# Altium schematic symbol library IC_Digital.SchLib: 23 symbols
Pins are listed as number, name and electrical type; pins without a type are passive.

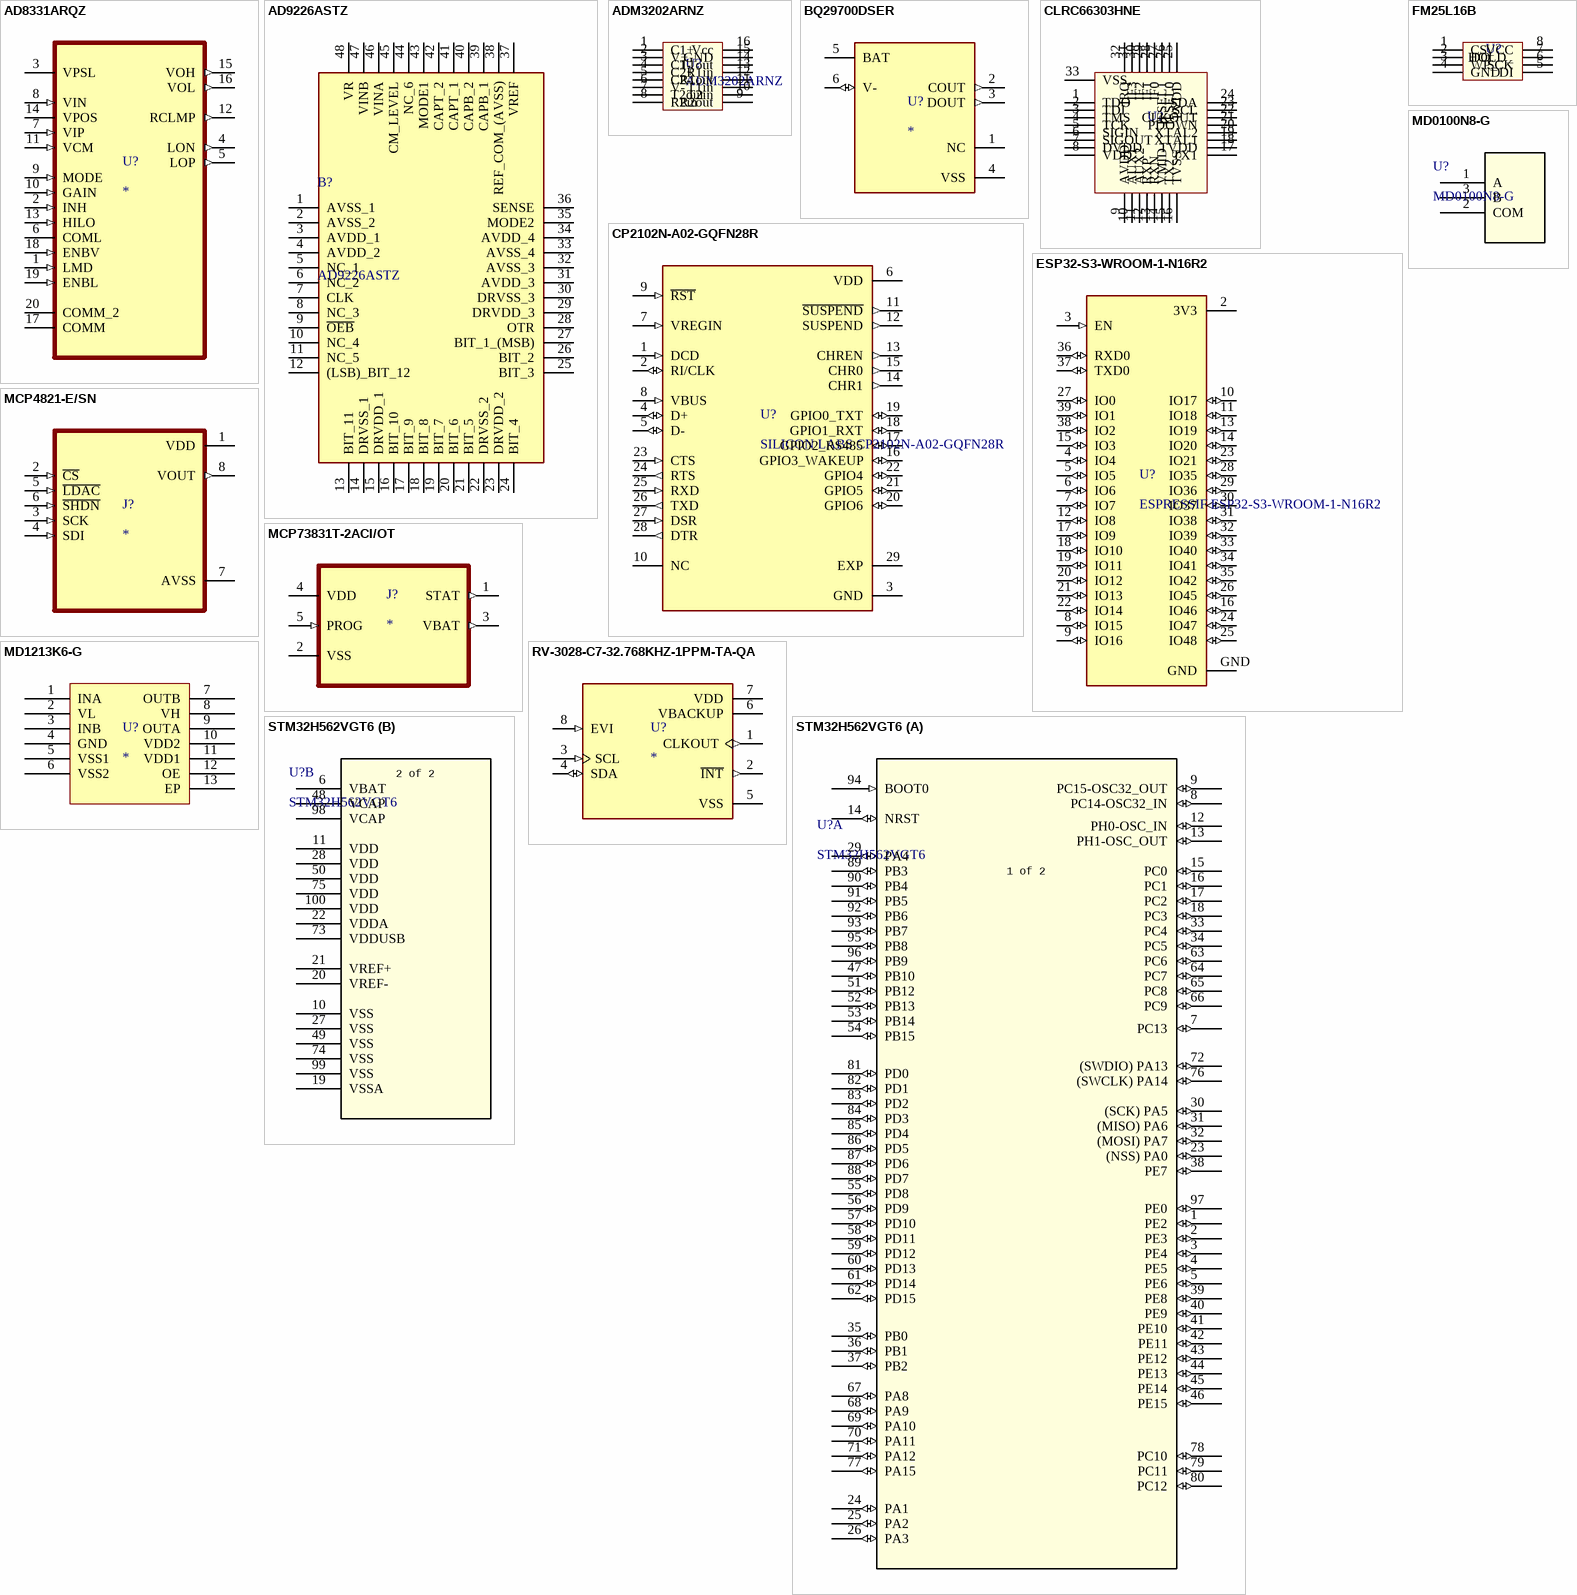
[diagram p0: symbols AD8331ARQZ to STM32H562VGT6]

## AD8331ARQZ
designator U?
Single VGA with Ultralow Noise Preamplifier and Programmable RIN; MF: Analog Devices; MP: AD8331ARQZ; SnapEDA_Link: https://www.snapeda.com/parts/AD8331ARQZ/Analog+Devices/view-part/?ref=snap; Package: QSOP-20 Analog Devices; Value: *; Check_prices: https://www.snapeda.com/parts/AD8331ARQZ/Analog+Devices/view-part/?ref=eda
footprint SOP64P600X165-20N
pins: 1 LMD (in), 2 INH (in), 3 VPSL (power), 4 LON (out), 5 LOP (out), 6 COML, 7 VIP (in), 8 VIN (in), 9 MODE (in), 10 GAIN (in), 11 VCM (in), 12 RCLMP (out), 13 HILO (in), 14 VPOS (power), 15 VOH (out), 16 VOL (out), 17 COMM, 18 ENBV (in), 19 ENBL (in), 20 COMM_2

## AD9226ASTZ
designator B?
AD9226ASTZ, 12 bit-Bit DAC 65Msps, Parallel, 48-Pin LQFP; Manufacturer_Name: Analog Devices; Geometry.Height: 1.6mm; Manufacturer_Part_Number: AD9226ASTZ; Mouser Part Number: 584-AD9226ASTZ; Mouser Price/Stock: https://www.mouser.co.uk/ProductDetail/Analog-Devices/AD9226ASTZ?qs=%2FtpEQrCGXCz2C6o%252BfI8LqA%3D%3D; Arrow Part Number: AD9226ASTZ; Arrow Price/Stock: https://www.arrow.com/en/products/ad9226astz/analog-devices?utm_currency=USD&region=nac; Datasheet Link: https://datasheet.datasheetarchive.com/originals/distributors/Datasheets-4/DSA-70171.pdf
footprint QFP50P900X900X160-48N
pins: 1 AVSS_1, 2 AVSS_2, 3 AVDD_1, 4 AVDD_2, 5 NC_1, 6 NC_2, 7 CLK, 8 NC_3, 9 ~{OEB}, 10 NC_4, 11 NC_5, 12 (LSB)_BIT_12, 13 BIT_11, 14 DRVSS_1, 15 DRVDD_1, 16 BIT_10, 17 BIT_9, 18 BIT_8, 19 BIT_7, 20 BIT_6, 21 BIT_5, 22 DRVSS_2, 23 DRVDD_2, 24 BIT_4, 25 BIT_3, 26 BIT_2, 27 BIT_1_(MSB), 28 OTR, 29 DRVDD_3, 30 DRVSS_3, 31 AVDD_3, 32 AVSS_3, 33 AVSS_4, 34 AVDD_4, 35 MODE2, 36 SENSE, 37 VREF, 38 REF_COM_(AVSS), 39 CAPB_1, 40 CAPB_2, 41 CAPT_1, 42 CAPT_2, 43 MODE1, 44 NC_6, 45 CM_LEVEL, 46 VINA, 47 VINB, 48 VR

## ADM3202ARNZ
designator U?
note: Original; val: ADM3202ARNZ; sample link: https://www.lcsc.com/product-detail/RS232-ICs_Analog-Devices-ADM3202ARNZ-REEL_C496498.html
footprint 16SOIC_N (SOIC, 16-Leads, Body 9,90x3,90mm, Pitch 1,27mm, IPC Medium Density)
pins: 1 C1+, 2 V+, 3 C1-, 4 C2+, 5 C2-, 6 V-, 7 T2out, 8 R2in, 9 R2out, 10 T2in, 11 T1in, 12 R1out, 13 R1in, 14 T1out, 15 GND, 16 Vcc

## BQ29700DSER
designator U?
Li-Ion/Li Polymer Advanced Single-Cell Battery Protector IC Family 6-WSON -40 to 85; MF: Texas Instruments; MP: BQ29700DSER; Price: None; Value: *; Availability: Good; SnapEDA_Link: https://www.snapeda.com/parts/BQ29700DSER/Texas%20Instruments/view-part/535836/?ref=snap; Purchase-URL: https://pricing.snapeda.com/search/part/BQ29700DSER/?ref=eda; Package: WSON-6 Texas Instruments
footprint SON50P150X150X80-6N
pins: 1 NC, 2 COUT (out), 3 DOUT (out), 4 VSS (power), 5 BAT (power), 6 V- (io)

## CLRC66303HNE
designator U?, comment NXP CLRC66303HNE  (value not drawn)
ISO 14443A,ISO 14443B,MIFARE I2C,SPI,UART HVQFN-32-EP(5x5) RFID, RF Access, Monitoring ICs RoHS; sample link: https://www.lcsc.com/product-detail/C468447.html?s_z=n_CLRC663; val: NXP CLRC66303HNE
footprint QFN50P500X500X100_HS-33N (QFN, 32-Leads, Body 5,00x5,00mm, Pitch 0,50mm, Thermal Pad 3,10x3,10mm, IPC Medium Density)
pins: 1 TDO "O", 2 TDI "I", 3 TMS "I", 4 TCK "I", 5 SIGIN "I", 6 SIGOUT "O", 7 DVDD "PWR", 8 VDD "PWR", 9 AVDD "PWR", 10 AUX1 "O", 11 AUX2 "O", 12 RXP "I", 13 RXN "I", 14 VMID "PWR", 15 TX2 "O", 16 TVSS "PWR", 17 TX1 "O", 18 TVDD "PWR", 19 XTAL1 "I", 20 XTAL2 "O", 21 PDOWN "I", 22 CLKOUT "O", 23 SCL "O", 24 SDA "I/O", 25 PVDD "PWR", 26 IFSEL0 "I", 27 IFSEL1 "I", 28 IF0 "I/O", 29 IF1 "I/O", 30 IF2 "I/O", 31 IF3 "I/O", 32 IRQ "O", 33 VSS "PWR"

## CP2102N-A02-GQFN28R
designator U?, comment SILICON LABS CP2102N-A02-GQFN28R
USB to UART USB 2.0 QFN-28-EP(5x5) Interface Controllers RoHS; val: SILICON LABS CP2102N-A02-GQFN28R; note: *; sample link: https://www.lcsc.com/product-detail/C964632.html?s_z=n_CP2102N-A02-GQFN28
footprint IC_CP2102N-A02-GQFN28R
pins: 1 DCD (in), 2 RI/CLK (io), 3 GND (power), 4 D+ (io), 5 D- (io), 6 VDD (power), 7 VREGIN (in), 8 VBUS (in), 9 ~{RST} (in), 10 NC, 11 ~{SUSPEND} (out), 12 SUSPEND (out), 13 CHREN (out), 14 CHR1 (out), 15 CHR0 (out), 16 GPIO3_WAKEUP (io), 17 GPIO2_RS485 (io), 18 GPIO1_RXT (io), 19 GPIO0_TXT (io), 20 GPIO6 (io), 21 GPIO5 (io), 22 GPIO4 (io), 23 CTS (in), 24 RTS (out), 25 RXD (in), 26 TXD (out), 27 DSR (in), 28 DTR (out), 29 EXP (power)

## ESP32-S3-WROOM-1-N16R2
designator U?, comment ESPRESSIF ESP32-S3-WROOM-1-N16R2
2.4GHz ESP32-S3 On-board PCB Antenna -103.5dBm SMD,25.5x18mm RF Transceiver Modules and Modems RoHS; val: ESPRESSIF ESP32-S3-WROOM-1-N16R2; note: *; sample link: https://www.lcsc.com/product-detail/C2913205.html?s_z=n_esp32-s3
footprint XCVR_ESP32-S3-WROOM-1-N16R2
pins: 2 3V3 (power), 3 EN (in), 4 IO4 (io), 5 IO5 (io), 6 IO6 (io), 7 IO7 (io), 8 IO15 (io), 9 IO16 (io), 10 IO17 (io), 11 IO18 (io), 12 IO8 (io), 13 IO19 (io), 14 IO20 (io), 15 IO3 (io), 16 IO46 (io), 17 IO9 (io), 18 IO10 (io), 19 IO11 (io), 20 IO12 (io), 21 IO13 (io), 22 IO14 (io), 23 IO21 (io), 24 IO47 (io), 25 IO48 (io), 26 IO45 (io), 27 IO0 (io), 28 IO35 (io), 29 IO36 (io), 30 IO37 (io), 31 IO38 (io), 32 IO39 (io), 33 IO40 (io), 34 IO41 (io), 35 IO42 (io), 36 RXD0 (io), 37 TXD0 (io), 38 IO2 (io), 39 IO1 (io), GND (power)

## FM25L16B
designator U?
FM25L16B F-RAM; value: FM25L16B; Supplier 1: Digi-Key; Supplier Part Number 1: FM25L16B-GRA-ND
footprint 8SOIC_N (SOIC, 8-Leads, Body 4,90x3,90mm, Pitch 1,27mm, IPC Medium Density)
pins: 1 CS_, 2 DO, 3 WP_, 4 GND, 5 DI, 6 SCK, 7 HOLD_, 8 VCC

## MCP4821-E/SN
designator J?
SINGLE 12-BIT DAC WITH SPI INTERACE AND INTERNAL VREF, SOIC-8 | Microchip Technology Inc. MCP4821-E/SN; SnapEDA_Link: https://www.snapeda.com/parts/MCP4821-E/SN/Microchip+Technology/view-part/?ref=snap; Package: SOIC-8 Microchip; Value: *; MF: Microchip; MP: MCP4821-E/SN; Check_prices: https://www.snapeda.com/parts/MCP4821-E/SN/Microchip+Technology/view-part/?ref=eda
footprint SOIC127P600X175-8N
pins: 1 VDD (power), 2 ~{CS} (in), 3 SCK (in), 4 SDI (in), 5 ~{LDAC} (in), 6 ~{SHDN} (in), 7 AVSS (power), 8 VOUT (out)

## MCP73831T-2ACI/OT
designator J?
Charger IC Lithium Ion/Polymer SOT-23-5; MF: Microchip; MP: MCP73831T-2ACI/OT; Package: SOT-23 Microchip; Purchase-URL: https://pricing.snapeda.com/search/part/MCP73831T-2ACI/OT/?ref=eda; Value: *; Availability: In Stock; SnapEDA_Link: https://www.snapeda.com/parts/MCP73831T-2ACI/OT/Microchip/view-part/?ref=snap; Price: None; Check_prices: https://www.snapeda.com/parts/MCP73831T-2ACI/OT/Microchip/view-part/?ref=eda
footprint SOT95P280X145-5N
pins: 1 STAT (out), 2 VSS (power), 3 VBAT (out), 4 VDD (power), 5 PROG (in)

## MD0100N8-G
designator U?
Description; Manufacturer_Name: Microchip; Copyright: Copyright (C) 2025 Ultra Librarian. All rights reserved.; Manufacturer_Part_Number: MD0100N8-G; RefDes: RefDes; Type: Type
footprint TO-243AA_MCH
pins: 1 A, 2 COM, 3 B

## MD1213K6-G
designator U?
footprint QFN80P400X400X90-13N
pins: 1 INA, 2 VL, 3 INB, 4 GND, 5 VSS1, 6 VSS2, 7 OUTB, 8 VH, 9 OUTA, 10 VDD2, 11 VDD1, 12 OE, 13 EP (power)

## RV-3028-C7-32.768KHZ-1PPM-TA-QA
designator U?
Extreme Low Power RTC Module; MF: {'manufacturer': u'Micro Crystal'}; MP: RV-3028-C7-32.768KHZ-1PPM-TA-QA; Package: None; Price: None; Value: *; Availability: Unavailable
footprint IC_RV-3028-C7-32.768KHZ-1PPM-TA-QA - duplicate
pins: 1 CLKOUT (out), 2 ~{INT} (out), 3 SCL (in), 4 SDA (io), 5 VSS (power), 6 VBACKUP (power), 7 VDD (power), 8 EVI (in)

## STM32H562VGT6
designator U?
High-performance, Arm Cortex-M33 with TrustZone, MCU with 1-MByte Flash, 640-Kbyte RAM, 250 MHz CPU; note: Original; val: STM32H562VGT6; sample link: https://www.lcsc.com/product-detail/C22452133.html?s_z=n_STM32H562
footprint LQFP-100_STM
part A pins: 1 PE2 (io), 2 PE3 (io), 3 PE4 (io), 4 PE5 (io), 5 PE6 (io), 7 PC13 (io), 8 PC14-OSC32_IN (io), 9 PC15-OSC32_OUT (io), 12 PH0-OSC_IN (io), 13 PH1-OSC_OUT (io), 14 NRST (io), 15 PC0 (io), 16 PC1 (io), 17 PC2 (io), 18 PC3 (io), 23 (NSS) PA0 (io), 24 PA1 (io), 25 PA2 (io), 26 PA3 (io), 29 PA4 (io), 30 (SCK) PA5 (io), 31 (MISO) PA6 (io), 32 (MOSI) PA7 (io), 33 PC4 (io), 34 PC5 (io), 35 PB0 (io), 36 PB1 (io), 37 PB2 (io), 38 PE7 (io), 39 PE8 (io), 40 PE9 (io), 41 PE10 (io), 42 PE11 (io), 43 PE12 (io), 44 PE13 (io), 45 PE14 (io), 46 PE15 (io), 47 PB10 (io), 51 PB12 (io), 52 PB13 (io), 53 PB14 (io), 54 PB15 (io), 55 PD8 (io), 56 PD9 (io), 57 PD10 (io), 58 PD11 (io), 59 PD12 (io), 60 PD13 (io), 61 PD14 (io), 62 PD15 (io), 63 PC6 (io), 64 PC7 (io), 65 PC8 (io), 66 PC9 (io), 67 PA8 (io), 68 PA9 (io), 69 PA10 (io), 70 PA11 (io), 71 PA12 (io), 72 (SWDIO) PA13 (io), 76 (SWCLK) PA14 (io), 77 PA15 (io), 78 PC10 (io), 79 PC11 (io), 80 PC12 (io), 81 PD0 (io), 82 PD1 (io), 83 PD2 (io), 84 PD3 (io), 85 PD4 (io), 86 PD5 (io), 87 PD6 (io), 88 PD7 (io), 89 PB3 (io), 90 PB4 (io), 91 PB5 (io), 92 PB6 (io), 93 PB7 (io), 94 BOOT0 (in), 95 PB8 (io), 96 PB9 (io), 97 PE0 (io)
part B pins: 6 VBAT (power), 10 VSS (power), 11 VDD (power), 19 VSSA (power), 20 VREF- (power), 21 VREF+ (power), 22 VDDA (power), 27 VSS (power), 28 VDD (power), 48 VCAP (power), 49 VSS (power), 50 VDD (power), 73 VDDUSB (power), 74 VSS (power), 75 VDD (power), 98 VCAP (power), 99 VSS (power), 100 VDD (power)
part A text: 1 of 2
part B text: 2 of 2

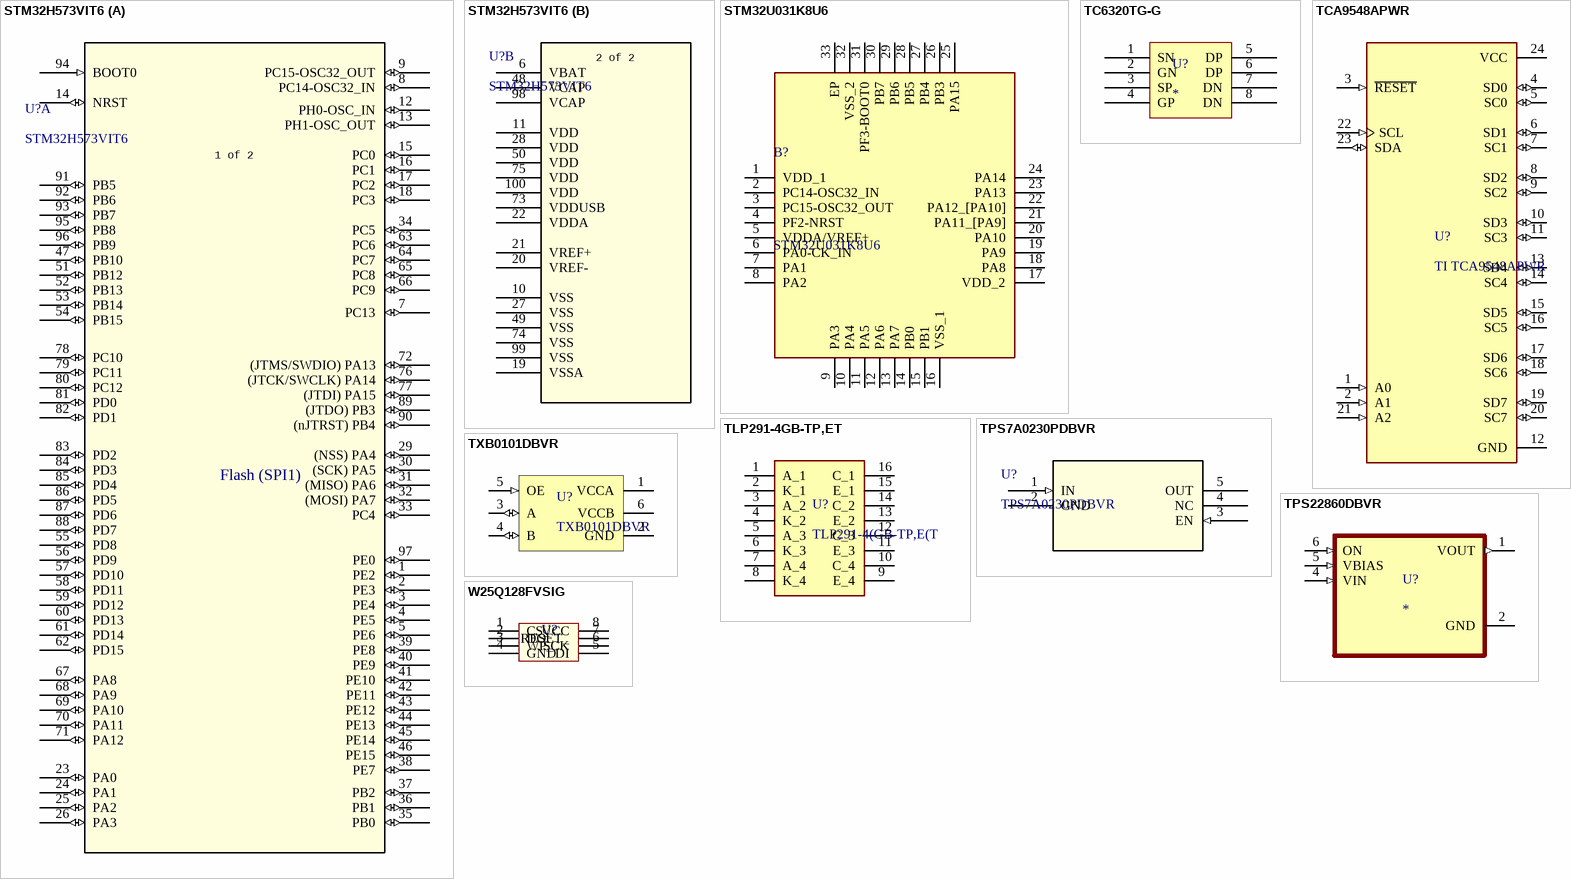
[diagram p1: symbols STM32H573VIT6 to W25Q128FVSIG]

## STM32H573VIT6
designator U?
High-performance, Arm Cortex-M33 with TrustZone, MCU with 1-MByte Flash, 640-Kbyte RAM, 250 MHz CPU; note: Original; val: STM32H573VIT6; sample link: https://www.lcsc.com/product-detail/C7545121.html?s_z=n_stm32h573
footprint LQFP-100_STM
part A pins: 1 PE2 (io), 2 PE3 (io), 3 PE4 (io), 4 PE5 (io), 5 PE6 (io), 7 PC13 (io), 8 PC14-OSC32_IN (io), 9 PC15-OSC32_OUT (io), 12 PH0-OSC_IN (io), 13 PH1-OSC_OUT (io), 14 NRST (io), 15 PC0 (io), 16 PC1 (io), 17 PC2 (io), 18 PC3 (io), 23 PA0 (io), 24 PA1 (io), 25 PA2 (io), 26 PA3 (io), 29 (NSS) PA4 (io), 30 (SCK) PA5 (io), 31 (MISO) PA6 (io), 32 (MOSI) PA7 (io), 33 PC4 (io), 34 PC5 (io), 35 PB0 (io), 36 PB1 (io), 37 PB2 (io), 38 PE7 (io), 39 PE8 (io), 40 PE9 (io), 41 PE10 (io), 42 PE11 (io), 43 PE12 (io), 44 PE13 (io), 45 PE14 (io), 46 PE15 (io), 47 PB10 (io), 51 PB12 (io), 52 PB13 (io), 53 PB14 (io), 54 PB15 (io), 55 PD8 (io), 56 PD9 (io), 57 PD10 (io), 58 PD11 (io), 59 PD12 (io), 60 PD13 (io), 61 PD14 (io), 62 PD15 (io), 63 PC6 (io), 64 PC7 (io), 65 PC8 (io), 66 PC9 (io), 67 PA8 (io), 68 PA9 (io), 69 PA10 (io), 70 PA11 (io), 71 PA12 (io), 72 (JTMS/SWDIO) PA13 (io), 76 (JTCK/SWCLK) PA14 (io), 77 (JTDI) PA15 (io), 78 PC10 (io), 79 PC11 (io), 80 PC12 (io), 81 PD0 (io), 82 PD1 (io), 83 PD2 (io), 84 PD3 (io), 85 PD4 (io), 86 PD5 (io), 87 PD6 (io), 88 PD7 (io), 89 (JTDO) PB3 (io), 90 (nJTRST) PB4 (io), 91 PB5 (io), 92 PB6 (io), 93 PB7 (io), 94 BOOT0 (in), 95 PB8 (io), 96 PB9 (io), 97 PE0 (io)
part B pins: 6 VBAT (power), 10 VSS (power), 11 VDD (power), 19 VSSA (power), 20 VREF- (power), 21 VREF+ (power), 22 VDDA (power), 27 VSS (power), 28 VDD (power), 48 VCAP (power), 49 VSS (power), 50 VDD (power), 73 VDDUSB (power), 74 VSS (power), 75 VDD (power), 98 VCAP (power), 99 VSS (power), 100 VDD (power)
part A text: 1 of 2; Flash (SPI1)
part B text: 2 of 2

## STM32U031K8U6
designator B?
Ultra-low-power features (ultra-low-power devices)  1.71 V to 3.6 V power supply  -40 C to 85/125 C temperature range  VBAT mode: 130 nA (with RTC and 9 x 32-bit backup registers)  Shutdown mode (4 wake-up pins): 16 nA  Standby mode (4 wake-up pins): 160 nA with RTC, 30 nA without RTC  Stop 2 mode: 630 nA with RTC, 515 nA without RTC  Run mode (LDO mode): 52 uA/MHz  Batch acquisition mode (BAM)  4 us wake-up from Stop mode  Brownout reset (BOR); Manufacturer_Name: STMicroelectronics; Geometry.Height: 0.6mm; Manufacturer_Part_Number: STM32U031K8U6; Mouser Part Number: 511-STM32U031K8U6; Mouser Price/Stock: https://www.mouser.co.uk/ProductDetail/STMicroelectronics/STM32U031K8U6?qs=dbcCsuKDzFUeNQ2GzBLCmw%3D%3D; Arrow Part Number: STM32U031K8U6; Arrow Price/Stock: https://www.arrow.com/en/products/stm32u031k8u6/stmicroelectronics.html?utm_currency=USD&region=nac; Datasheet Link: https://www.st.com/resource/en/datasheet/stm32u031f4.pdf
footprint QFN50P500X500X60-33N-D
pins: 1 VDD_1, 2 PC14-OSC32_IN, 3 PC15-OSC32_OUT, 4 PF2-NRST, 5 VDDA/VREF+, 6 PA0-CK_IN, 7 PA1, 8 PA2, 9 PA3, 10 PA4, 11 PA5, 12 PA6, 13 PA7, 14 PB0, 15 PB1, 16 VSS_1, 17 VDD_2, 18 PA8, 19 PA9, 20 PA10, 21 PA11_[PA9], 22 PA12_[PA10], 23 PA13, 24 PA14, 25 PA15, 26 PB3, 27 PB4, 28 PB5, 29 PB6, 30 PB7, 31 PF3-BOOT0, 32 VSS_2, 33 EP

## TC6320TG-G
designator U?
footprint SOIC127P600X175-8N
pins: 1 SN, 2 GN, 3 SP, 4 GP, 5 DP, 6 DP, 7 DN, 8 DN

## TCA9548APWR
designator U?, comment TI TCA9548APWR
1.65V~5.5V 400Kbps TSSOP-24 Signal Switches, Multiplexers, Decoders RoHS; val: TI TCA9548APWR; sample link: https://www.lcsc.com/product-detail/C130026.html?s_z=n_TCA9548A
footprint SOP65P640X120-24N
pins: 1 A0 (in), 2 A1 (in), 3 ~{RESET} (in), 4 SD0 (io), 5 SC0 (io), 6 SD1 (io), 7 SC1 (io), 8 SD2 (io), 9 SC2 (io), 10 SD3 (io), 11 SC3 (io), 12 GND (power), 13 SD4 (io), 14 SC4 (io), 15 SD5 (io), 16 SC5 (io), 17 SD6 (io), 18 SC6 (io), 19 SD7 (io), 20 SC7 (io), 21 A2 (in), 22 SCL (in), 23 SDA (io), 24 VCC (power)

## TLP291-4GB-TP,ET
designator U?, comment TLP291-4(GB-TP,E(T
4-Channel Optocoupler; note: Original; val: TLP291-4(GB-TP,E(T; sample link: https://www.lcsc.com/product-detail/C60900.html
footprint SO16_TOS
pins: 1 A_1, 2 K_1, 3 A_2, 4 K_2, 5 A_3, 6 K_3, 7 A_4, 8 K_4, 9 E_4, 10 C_4, 11 E_3, 12 C_3, 13 E_2, 14 C_2, 15 E_1, 16 C_1

## TPS7A0230PDBVR
designator U?
200mA, nanopower-IQ (25 nA), low-dropout (LDO) voltage regulator with enable 5-SOT-23 -40 to 125; Manufacturer_Name: Texas Instruments; Copyright: Copyright (C) 2026 Ultra Librarian. All rights reserved.; Manufacturer_Part_Number: TPS7A0230PDBVR; RefDes: RefDes; Type: Type
footprint SOT23_DBV_TEX
pins: 1 IN (in), 2 GND (power), 3 EN (in), 4 NC, 5 OUT (power)

## TPS22860DBVR
designator U?
0.73-â„¦, 5-V, ultra-low leakage load switch; MF: Texas Instruments; MP: TPS22860DBVR; SnapEDA_Link: https://www.snapeda.com/parts/TPS22860DBVR/Texas+Instruments/view-part/?ref=snap; Package: SOT-23-6 Texas Instruments; Value: *; Check_prices: https://www.snapeda.com/parts/TPS22860DBVR/Texas+Instruments/view-part/?ref=eda
footprint SOT95P280X145-6N
pins: 1 VOUT (out), 2 GND (power), 4 VIN (in), 5 VBIAS (in), 6 ON (in)

## TXB0101DBVR
designator U?
1-Bit Bidirectional Voltage-Level Shifter With Auto Direction Sensing and +/-15-kV ESD Protect; note: Original; val: TXB0101DBVR; sample link: https://www.lcsc.com/product-detail/C2652944.html?s_z=n_TXB0101
footprint SOT95P280X145-6N
pins: 1 VCCA (power), 2 GND (power), 3 A (io), 4 B (io), 5 OE (in), 6 VCCB (power)

## W25Q128FVSIG
designator U?  (value not drawn)
FLASH - NOR Memory IC 128Mbit SPI - Quad I/O, QPI 104 MHz 8-SOIC from Winbond Electronics.; note: Original; val: W25Q128FVSIG; sample link: https://www.lcsc.com/product-detail/NOR-FLASH_Winbond-Elec-W25Q128JVSIQ_C113767.html
footprint 8SOIC_208 (SOIC, 8-Leads, Body 5,23x5,23mm, Pitch 1,27mm, IPC Medium Density)
pins: 1 CS_, 2 DO, 3 WP_, 4 GND, 5 DI, 6 SCK, 7 RESET_, 8 VCC